# Altium footprint library UCP.PcbLib: 222 footprints (part 9 of 14)
Each footprint in its own frame and in the unit in brackets; x right, y up, seen from the top. Pads: shape width x height; smd on the part's side, far side on the other; paste and mask are expansions set on the pad; w line width, h text height; cw(c..) or ccw(c..) is an arc to the next point about the centre after c.
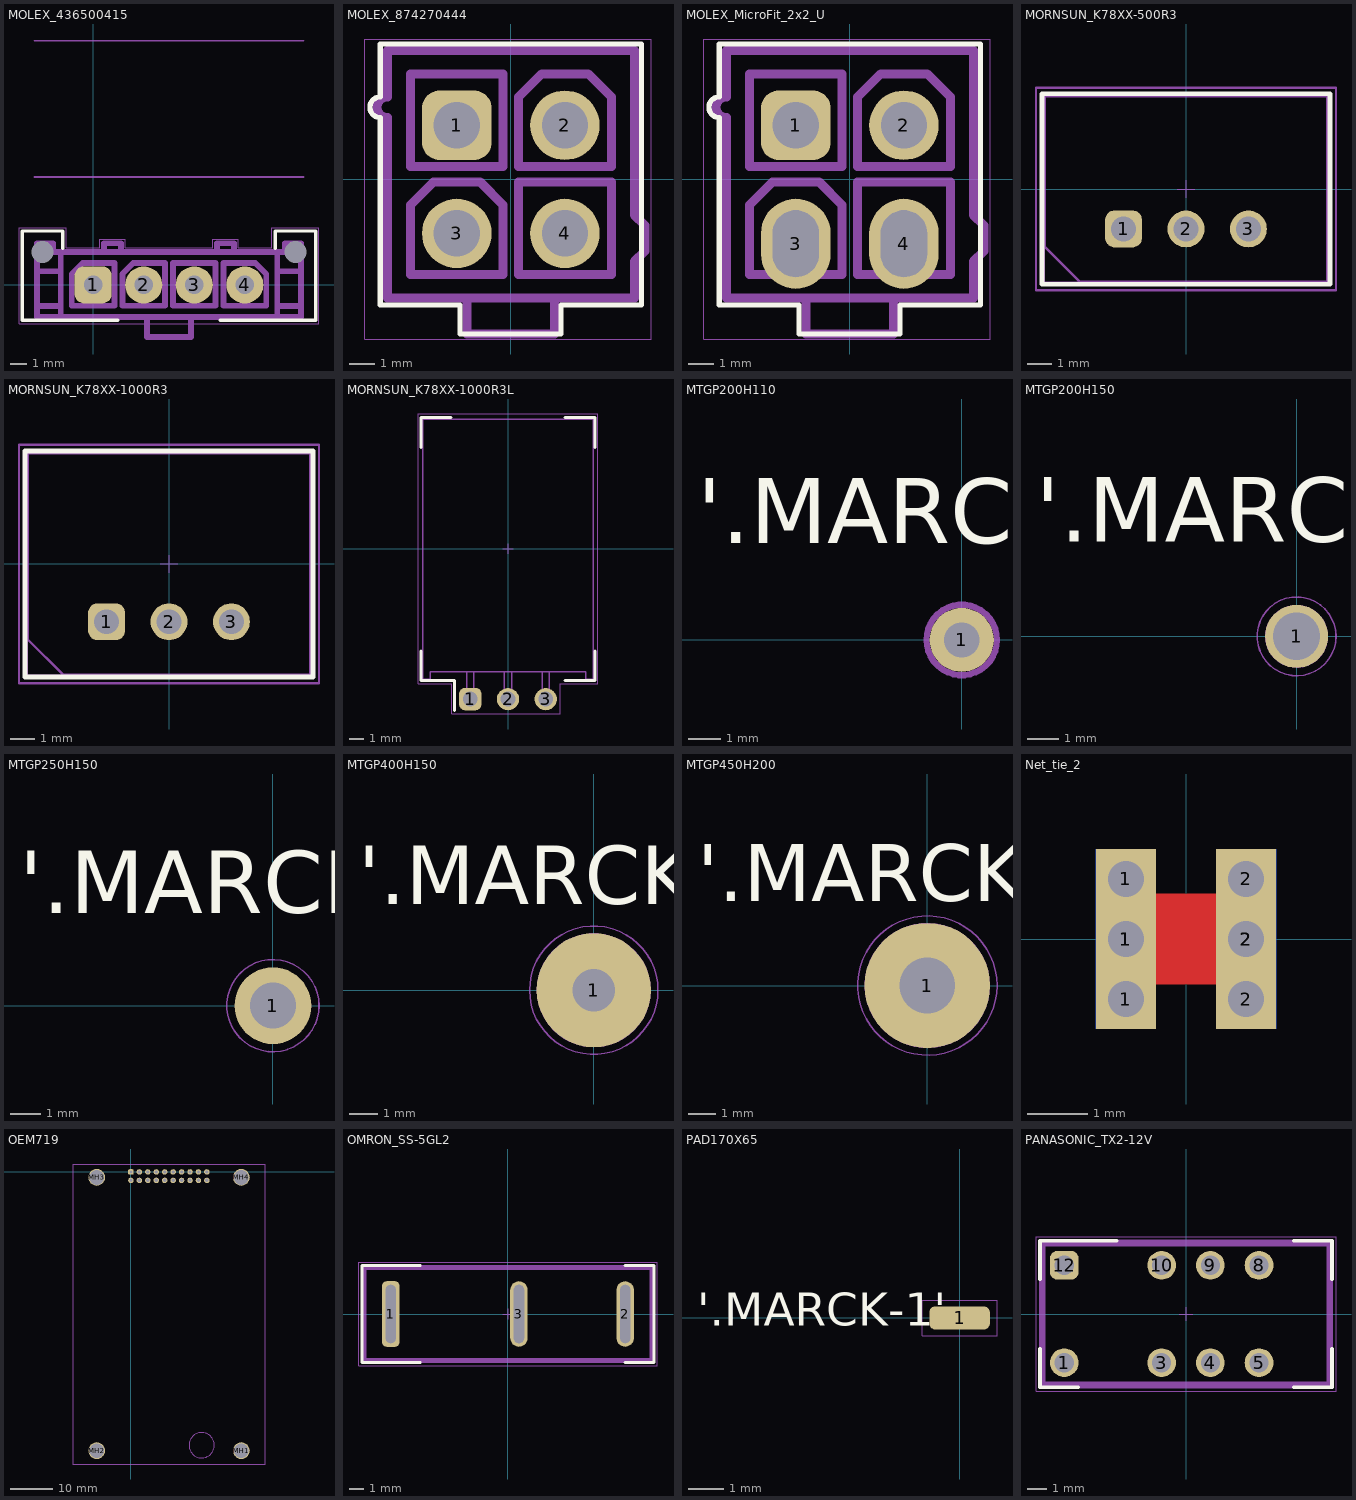
[diagram p8: the footprints below, top view; thin cyan lines are the x and y axes]

## MOLEX_436500415 [mm]
height 9
pads (6):
  rrect50% 2.2x2.2 hole 1.1: 1(0,0)
  round 2.2 hole 1.1: 2(3,0) 3(6,0) 4(9,0)
  round 0 hole 1.3 unplated mask+0.25: MT1(-3,1.96) MT2(12,1.96)
Top Overlay:
  lines w0.2: -1.8,2.16 -1.8,3.2 -4.2,3.2 -4.2,-2.1 1.475,-2.1 ; 7.525,-2.1 13.2,-2.1 13.2,3.2 10.8,3.2 10.8,2.16
Dimensions:
  lines w0.1: -3.5,6.4 12.5,6.4 ; -3.5,14.48 12.5,14.48
  text "Min" at 10.41,6.52 h1.6
  text "Max" at 10.41,14.6 h1.6
  text "Bord edge" at 2,14.6 h1.6
  text "Bord edge" at 2,6.52 h1.6
Top Assembly:
  lines w0.35: 0.65,1.96 0.65,2.47 1.65,2.47 1.65,1.96 ; 3.2,-1.9 3.2,-3.1 5.8,-3.1 5.8,-1.9 ; 7.35,1.96 7.35,2.47 8.35,2.47 8.35,1.96 ; -3.325,-1.26 -3.325,-1.9 -1.925,-1.9 ; -3.325,-1.26 -1.925,-1.26 ; -3.325,-1.26 -3.325,0.81 ; -3.325,0.81 -1.925,0.81 ; -3.325,0.81 -3.325,1.45 ; -3.325,1.45 -2.39,1.96 ; -3.325,1.45 -3.325,2.47 -2.39,2.47 -2.39,1.96 ; -2.39,1.96 -1.925,1.96 ; -1.925,-1.9 -1.925,-1.26 ; -1.925,-1.9 10.925,-1.9 ; -1.925,-1.26 -1.925,0.81 ; -1.925,0.81 -1.925,1.96 ; -1.925,1.96 10.925,1.96 ; -0.32,-0.32 0.32,-0.32 ; -0.32,-0.32 -0.32,0.32 ; -0.32,-0.32 -0.111,-0.111 ; -0.32,0.32 0.32,0.32 ; -0.32,0.32 -0.111,0.111 ; -0.111,-0.111 0.111,-0.111 ; -0.111,-0.111 -0.111,0.111 ; -0.111,0.111 0.111,0.111 ; 0.111,-0.111 0.111,0.111 ; 0.111,-0.111 0.32,-0.32 ; 0.111,0.111 0.32,0.32 ; 0.32,-0.32 0.32,0.32 ; 2.68,-0.32 2.68,0.32 ; 2.68,-0.32 2.9,-0.111 ; 2.68,-0.32 3.32,-0.32 ; 2.68,0.32 2.9,0.111 ; 2.68,0.32 3.32,0.32 ; 2.9,-0.111 2.9,0.111 ; 2.9,-0.111 3.1,-0.111 ; 2.9,0.111 3.1,0.111 ; 3.1,-0.111 3.1,0.111 ; 3.1,-0.111 3.32,-0.32 ; 3.1,0.111 3.32,0.32 ; 3.32,-0.32 3.32,0.32 ; 5.68,-0.32 5.68,0.32 ; 5.68,-0.32 6.32,-0.32 ; 5.68,-0.32 5.889,-0.111 ; 5.68,0.32 5.889,0.111 ; 5.68,0.32 6.32,0.32 ; 5.889,-0.111 5.889,0.111 ; 5.889,-0.111 6.111,-0.111 ; 5.889,0.111 6.111,0.111 ; 6.111,-0.111 6.32,-0.32 ; 6.111,-0.111 6.111,0.111 ; 6.111,0.111 6.32,0.32 ; 6.32,-0.32 6.32,0.32 ; 8.68,-0.32 8.9,-0.111 ; 8.68,-0.32 8.68,0.32 ; 8.68,-0.32 9.32,-0.32 ; 8.68,0.32 8.9,0.111 ; 8.68,0.32 9.32,0.32 ; 8.9,-0.111 8.9,0.111 ; 8.9,-0.111 9.1,-0.111 ; 8.9,0.111 9.1,0.111 ; 9.1,-0.111 9.32,-0.32 ; 9.1,-0.111 9.1,0.111 ; 9.1,0.111 9.32,0.32 ; 9.32,-0.32 9.32,0.32 ; 10.925,-1.9 12.325,-1.9 12.325,-1.26 ; 10.925,-1.9 10.925,-1.26 ; 10.925,-1.26 12.325,-1.26 ; 10.925,-1.26 10.925,0.81 ; 10.925,0.81 10.925,1.96 ; 10.925,0.81 12.325,0.81 ; 10.925,1.96 11.39,1.96 ; 11.39,1.96 11.39,2.47 12.325,2.47 12.325,1.45 ; 11.39,1.96 12.325,1.45 ; 12.325,-1.26 12.325,0.81 ; 12.325,0.81 12.325,1.45 ; -1.27,-1.24 1.27,-1.24 1.27,1.3 -0.62,1.3 -1.27,0.65 -1.27,-1.24 ; 1.73,-1.24 4.27,-1.24 4.27,1.3 2.38,1.3 1.73,0.65 1.73,-1.24 ; 4.73,-1.24 7.27,-1.24 7.27,1.3 4.73,1.3 4.73,-1.24 ; 7.73,-1.24 7.73,1.3 9.62,1.3 10.27,0.65 10.27,-1.24 7.73,-1.24
Top Courtyard:
  lines w0.05: -4.4,-2.3 13.4,-2.3 13.4,3.4 10.6,3.4 10.6,2.21 8.6,2.21 8.6,2.72 7.1,2.72 7.1,2.21 1.9,2.21 1.9,2.72 0.4,2.72 0.4,2.21 -1.6,2.21 -1.6,3.4 -4.4,3.4 -4.4,-2.3
Top Component Outline:
  lines w0.025: -3.325,-1.9 -3.325,1.57 -3.325,2.47 -2.69,2.47 -2.39,2.47 -2.39,1.96 0.65,1.96 0.65,2.47 1.65,2.47 1.65,1.96 7.35,1.96 7.35,2.47 8.35,2.47 8.35,1.96 11.39,1.96 11.39,2.47 11.69,2.47 12.325,2.47 12.325,1.57 12.325,-1.9 -3.325,-1.9
Top Component Terminal:
  lines w0.025: -0.32,-0.32 0.32,-0.32 0.32,0.32 -0.32,0.32 -0.32,-0.32 ; 2.68,-0.32 3.32,-0.32 3.32,0.32 2.68,0.32 2.68,-0.32 ; 5.68,-0.32 6.32,-0.32 6.32,0.32 5.68,0.32 5.68,-0.32 ; 8.68,-0.32 9.32,-0.32 9.32,0.32 8.68,0.32 8.68,-0.32
3D body "Вилка 436500415.stp": height 9.9, standoff -3.18, extent -3.325,-3.1 12.325,2.47

## MOLEX_874270444 [mm] "Header, Vertical Receptacle, 4.20 mm row X 5.50 mm column pitch; 1.19 mm lead width, 4 pins, 2 rows, 2 pins per row, 9.80 mm L X 9.60 mm W X 13.05 mm H body"
height 13.1
pads (4):
  rrect50% 2.7x2.7 hole 1.8: 1(-2.1,2.1)
  round 2.7 hole 1.8: 2(2.1,2.1) 3(-2.1,-2.1) 4(2.1,-2.1)
Top Overlay:
  lines w0.2: -5.075,2.398 cw(c-5.075,2.799) -5.075,3.2 -5.075,5.25 5.075,5.25 5.075,-4.875 1.95,-4.875 1.95,-6 -1.975,-6 -1.975,-4.875 -5.075,-4.875 -5.075,2.4
Top Assembly:
  lines w0.35: -1.7,-4.6 1.7,-4.6 ; -1.7,-4.6 -1.7,-6 1.7,-6 1.7,-4.6 ; -1.7,-4.6 -4.8,-4.6 -4.8,2.4 cw(c-4.8,2.8) -4.8,3.2 -4.8,5 4.8,5 4.8,-1.39 5.2,-1.79 5.2,-2.79 4.8,-3.19 4.8,-4.6 1.7,-4.6 ; -3.9,-3.7 -0.3,-3.7 -0.3,-1 -1.2,-0.1 -3,-0.1 -3.9,-1 -3.9,-3.7 ; -3.9,0.5 -0.3,0.5 -0.3,4.1 -3.9,4.1 -3.9,0.5 ; 0.3,-3.7 0.3,-0.1 3.9,-0.1 3.9,-3.7 0.3,-3.7 ; 0.3,0.5 0.3,3.2 1.2,4.1 3,4.1 3.9,3.2 3.9,0.5 0.3,0.5
Top Courtyard:
  lines w0.025: -5.675,-6.2 -5.675,5.45 5.45,5.45 5.45,-6.2 -5.675,-6.2
Top Component Outline:
  lines w0.025: -4.8,-4.6 -4.8,2.4 cw(c-4.8,2.8) -4.8,3.2 -4.8,5 4.8,5 4.8,-1.39 5.2,-1.79 5.2,-2.79 4.8,-3.19 4.8,-4.6 -4.8,-4.6
Top Component Terminal:
  lines w0.025: -2.65,-2.65 -2.65,-1.55 -1.55,-1.55 -1.55,-2.65 -2.65,-2.65 ; -2.65,1.55 -2.65,2.65 -1.55,2.65 -1.55,1.55 -2.65,1.55 ; 1.55,-2.65 1.55,-1.55 2.65,-1.55 2.65,-2.65 1.55,-2.65 ; 1.55,1.55 1.55,2.65 2.65,2.65 2.65,1.55 1.55,1.55
3D body "874270444.stp": height 13.5, standoff -2.1, extent -5.4,-6 5.4,5.4

## MOLEX_MicroFit_2x2_U [mm] "Header, Vertical Receptacle, 4.20 mm row X 5.50 mm column pitch; 1.19 mm lead width, 4 pins, 2 rows, 2 pins per row, 9.80 mm L X 9.60 mm W X 13.05 mm H body"
height 13.1
pads (4):
  rrect50% 2.7x2.7 hole 1.8: 1(-2.1,2.1)
  round 2.7 hole 1.8: 2(2.1,2.1)
  oval 2.7x3.5 hole 2.6 slot 1.8 at 0 deg: 3(-2.1,-2.5) 4(2.1,-2.5)
Top Overlay:
  lines w0.2: -5.075,2.398 cw(c-5.075,2.799) -5.075,3.2 -5.075,5.25 5.075,5.25 5.075,-4.875 1.95,-4.875 1.95,-6 -1.975,-6 -1.975,-4.875 -5.075,-4.875 -5.075,2.4
Top Assembly:
  lines w0.35: -1.7,-4.6 -4.8,-4.6 -4.8,2.4 cw(c-4.8,2.8) -4.8,3.2 -4.8,5 4.8,5 4.8,-1.39 5.2,-1.79 5.2,-2.79 4.8,-3.19 4.8,-4.6 1.7,-4.6 ; -1.7,-4.6 -1.7,-6 1.7,-6 1.7,-4.6 ; -1.7,-4.6 1.7,-4.6 ; -3.9,-3.7 -3.9,-1 -3,-0.1 -1.2,-0.1 -0.3,-1 -0.3,-3.7 -3.9,-3.7 ; -3.9,0.5 -3.9,4.1 -0.3,4.1 -0.3,0.5 -3.9,0.5 ; 0.3,-3.7 3.9,-3.7 3.9,-0.1 0.3,-0.1 0.3,-3.7 ; 0.3,0.5 3.9,0.5 3.9,3.2 3,4.1 1.2,4.1 0.3,3.2 0.3,0.5
Top Courtyard:
  lines w0.025: -5.675,-6.2 5.45,-6.2 5.45,5.45 -5.675,5.45 -5.675,-6.2
Top Component Outline:
  lines w0.025: -4.8,-4.6 4.8,-4.6 4.8,-3.19 5.2,-2.79 5.2,-1.79 4.8,-1.39 4.8,5 -4.8,5 -4.8,3.2 ccw(c-4.8,2.8) -4.8,2.4 -4.8,-4.6
Top Component Terminal:
  lines w0.025: -2.65,-2.85 -1.55,-2.85 ; -2.651,-2.85 -1.55,-2.85 ; -2.651,-2.85 -2.651,-3.49 -1.55,-3.49 -1.55,-2.85 ; 1.55,-2.85 2.65,-2.85 ; 1.55,-2.85 1.55,-3.49 2.651,-3.49 2.651,-2.85 ; 1.55,-2.85 2.651,-2.85 ; -2.65,-2.65 -1.55,-2.65 -1.55,-1.55 -2.65,-1.55 -2.65,-2.65 ; -2.65,1.55 -1.55,1.55 -1.55,2.65 -2.65,2.65 -2.65,1.55 ; -2.651,2.01 -1.55,2.01 -1.55,2.65 -2.651,2.65 -2.651,2.01 ; 1.55,-2.65 2.65,-2.65 2.65,-1.55 1.55,-1.55 1.55,-2.65 ; 1.55,1.55 2.65,1.55 2.65,2.65 1.55,2.65 1.55,1.55 ; 1.551,2.01 2.651,2.01 2.651,2.65 1.551,2.65 1.551,2.01
3D body "874270444.stp": height 13.5, standoff -2.1, extent -5.4,-6 5.4,5.4

## MORNSUN_K78XX-500R3 [mm] "3 pin, L = 11.60 mm, W = 7.55mm, H = 10.16 mm"
height 10.16
pads (3):
  rrect50% 1.5x1.5 hole 1: 1(-2.54,-1.625)
  round 1.5 hole 1: 2(0,-1.625) 3(2.54,-1.625)
Top Overlay:
  lines w0.2: -5.85,-3.875 5.85,-3.875 5.85,3.875 -5.85,3.875 -5.85,-3.875
Top Assembly:
  lines w0.1: -5.75,-2.335 -5.75,3.775 5.75,3.775 5.75,-3.775 -4.31,-3.775 -5.75,-2.335
Top Courtyard:
  lines w0.05: -0.35,0 0.35,0 ; 0,-0.35 0,0.35
  lines w0.1: -6.1,-4.125 6.1,-4.125 6.1,4.125 -6.1,4.125 -6.1,-4.125
Top Component Outline:
  lines w0.025: -5.75,-3.775 -5.75,3.775 5.75,3.775 5.75,-3.775 -5.75,-3.775
Top Component Terminal:
  lines w0.025: -2.79,-1.775 -2.79,-1.475 -2.29,-1.475 -2.29,-1.775 -2.79,-1.775 ; -0.25,-1.775 -0.25,-1.475 0.25,-1.475 0.25,-1.775 -0.25,-1.775 ; 2.29,-1.775 2.29,-1.475 2.79,-1.475 2.79,-1.775 2.29,-1.775
3D body "SIP3_S.stp": height 10.16, standoff -4.1, extent -5.8,-3.775 5.8,3.775

## MORNSUN_K78XX-1000R3 [mm] "3 pin, L = 11.50 mm, W = 9.00 mm, H = 17.50 mm"
height 17.5
pads (3):
  rrect50% 1.5x1.5 hole 1: 1(-2.54,-2.35)
  round 1.5 hole 1: 2(0,-2.35) 3(2.54,-2.35)
Top Overlay:
  lines w0.2: -5.85,-4.6 5.85,-4.6 5.85,4.6 -5.85,4.6 -5.85,-4.6
Top Assembly:
  lines w0.1: -5.75,-3.06 -5.75,4.5 5.75,4.5 5.75,-4.5 -4.31,-4.5 -5.75,-3.06
Top Courtyard:
  lines w0.05: -0.35,0 0.35,0 ; 0,-0.35 0,0.35
  lines w0.1: -6.1,-4.85 6.1,-4.85 6.1,4.85 -6.1,4.85 -6.1,-4.85
Top Component Outline:
  lines w0.025: -5.75,-4.5 -5.75,4.5 5.75,4.5 5.75,-4.5 -5.75,-4.5
Top Component Terminal:
  lines w0.025: -2.79,-2.5 -2.79,-2.2 -2.29,-2.2 -2.29,-2.5 -2.79,-2.5 ; -0.25,-2.5 -0.25,-2.2 0.25,-2.2 0.25,-2.5 -0.25,-2.5 ; 2.29,-2.5 2.29,-2.2 2.79,-2.2 2.79,-2.5 2.29,-2.5
3D body "SIP3.stp": height 17.5, standoff -4.1, extent -5.75,-4.5 5.75,4.5

## MORNSUN_K78XX-1000R3L [mm] "3 pin, L = 11.50 mm, W = 19.00 mm, H = 9 mm"
height 9
pads (3):
  rrect50% 1.5x1.5 hole 1: 1(-2.54,-10.125)
  round 1.5 hole 1: 2(0,-10.125) 3(2.54,-10.125)
Top Overlay:
  lines w0.2: -5.85,-6.875 -5.85,-8.875 -3.59,-8.875 -3.59,-10.875 ; -5.85,6.825 -5.85,8.825 -3.85,8.825 ; 3.85,-8.875 5.85,-8.875 5.85,-6.875 ; 3.85,8.825 5.85,8.825 5.85,6.825
Top Assembly:
  lines w0.1: -5.75,-8.775 -5.25,-8.775 -5.25,-8.275 5.25,-8.275 5.25,-8.775 5.75,-8.775 5.75,8.725 -5.75,8.725 -5.75,-8.775 ; -2.79,-10.275 -2.29,-10.275 -2.29,-8.275 -2.79,-8.275 -2.79,-10.275 ; -0.25,-10.275 0.25,-10.275 0.25,-8.275 -0.25,-8.275 -0.25,-10.275 ; 2.29,-10.275 2.79,-10.275 2.79,-8.275 2.29,-8.275 2.29,-10.275
Top Courtyard:
  lines w0.05: -0.35,0 0.35,0 ; 0,-0.35 0,0.35 ; -6.05,-9.075 -3.79,-9.075 -3.79,-11.125 3.535,-11.125 3.535,-9.075 6.05,-9.075 6.05,9.075 -6.05,9.075 -6.05,-9.075
Top Component Outline:
  lines w0.1: -5.75,-8.775 -5.25,-8.775 -5.25,-8.275 5.25,-8.275 5.25,-8.775 5.75,-8.775 5.75,8.725 -5.75,8.725 -5.75,-8.775
Top Component Terminal:
  lines w0.025: -2.79,-10.275 -2.79,-9.975 -2.29,-9.975 -2.29,-10.275 -2.79,-10.275 ; -0.25,-10.275 -0.25,-9.975 0.25,-9.975 0.25,-10.275 -0.25,-10.275 ; 2.29,-10.275 2.29,-9.975 2.79,-9.975 2.79,-10.275 2.29,-10.275
3D body "SIP3L.stp": height 9, standoff -4.1, extent -5.75,-10.275 5.75,8.725

## MTGP200H110 [mm] "Mounting Hole, Plated; 2.0 mm Pad, 1.10 mm Hole"
pads (1):
  round 2 hole 1.1: 1(0,0)
Top Overlay:
  text "'.MARCK-1'" at -8.262,2.339 h3.5
Top Designator:
  text ".Designator" at 0,0 h1.2
Top Assembly:
  circle w0.2: c0,0 r1.1
Bottom Assembly:
  circle w0.2: c0,0 r1.1
Top Courtyard:
  circle w0.05: c0,0 r1.1

## MTGP200H150 [mm] "Mounting Hole, Plated; 2.00 mm Pad, 1.50 mm Hole"
pads (1):
  round 2 hole 1.5: 1(0,0)
Top Overlay:
  text "'.MARCK-1'" at -8.262,2.339 h3.5
Top Designator:
  text ".Designator" at 0,0 h1.2
Top Assembly:
  circle w0.2: c0,0 r0.9
Bottom Assembly:
  circle w0.2: c0,0 r0.9
Top Courtyard:
  circle w0.05: c0,0 r1.25

## MTGP250H150 [mm] "Mounting Hole, Plated; 2.50 mm Pad, 1.50 mm Hole"
pads (1):
  round 2.5 hole 1.5: 1(0,0)
Top Overlay:
  text "'.MARCK-1'" at -8.262,2.339 h3.5
Top Designator:
  text ".Designator" at 0,0 h1.2
Top Assembly:
  circle w0.2: c0,0 r0.9
Bottom Assembly:
  circle w0.2: c0,0 r0.9
Top Courtyard:
  circle w0.05: c0,0 r1.5

## MTGP400H150 [mm] "Mounting Hole, Plated; 4.00 mm Pad, 1.50 mm Hole"
pads (1):
  round 4 hole 1.5: 1(0,0)
Top Overlay:
  text "'.MARCK-1'" at -8.262,2.339 h3.5
Top Designator:
  text ".Designator" at 0,0 h1.2
Top Assembly:
  circle w0.2: c0,0 r0.65
  circle w0.2: c0,0 r1.9
Bottom Assembly:
  circle w0.2: c0,0 r0.65
  circle w0.2: c0,0 r1.9
Top Courtyard:
  circle w0.05: c0,0 r2.25

## MTGP450H200 [mm] "Mounting Hole, Plated; 4.50 mm Pad, 2.00 mm Hole"
pads (1):
  round 4.5 hole 2: 1(0,0)
Top Overlay:
  text "'.MARCK-1'" at -8.262,2.339 h3.5
Top Designator:
  text ".Designator" at 0,0 h1.2
Top Assembly:
  circle w0.2: c0,0 r2.15
  circle w0.2: c0,0 r0.9
Bottom Assembly:
  circle w0.2: c0,0 r2.15
  circle w0.2: c0,0 r0.9
Top Courtyard:
  circle w0.05: c0,0 r2.5

## Net_tie_2 [mm] "Connection 2 pin"
pads (10):
  rect 1x1 hole 0.6 mask+0.102: 1(-1,-1) 1(-1,0) 1(-1,1) 2(1,-1) 2(1,0) 2(1,1)
  rect 1x3 smd mask+0.102: 1(-1,0) 2(1,0)
  rect 1x3 smd far side mask+0: 1(-1,0) 2(1,0)
Top Layer:
  region: -0.75,0.75 0.75,0.75 0.75,-0.75 -0.75,-0.75

## OEM719 [mm]
pads (24):
  rrect50% 1.3x1.3 hole 0.8: 1(0,0)
  round 1.3 hole 0.8: 2(0,-2) 3(2,0) 4(2,-2) 5(4,0) 6(4,-2) 7(6,0) 8(6,-2) 9(8,0) 10(8,-2) 11(10,0) 12(10,-2) 13(12,0) 14(12,-2) 15(14,0) 16(14,-2) 17(16,0) 18(16,-2) 19(18,0) 20(18,-2)
  round 4 hole 3.5: MH1(26.16,-66.05) MH2(-8.13,-66.05) MH3(-8.13,-1.28) MH4(26.16,-1.28)
Top Designator:
  text ".Designator" at -4.511,-0.453 h2
Top Dimensions:
  circle w0.254: c16.77,-64.76 r3
  lines w0.1: -13.83,-69.21 31.87,-69.21 31.87,1.89 -13.83,1.89 -13.83,-69.21
3D body "OEM719.stp": height 10.92, standoff -6, extent -13.843,-69.215 31.877,1.905

## OMRON_SS-5GL2 [mm]
height 19.3
pads (3):
  rrect50% 1.2x4.5 hole 0.7 slot 4 at 90 deg: 1(-8.05,0)
  oval 1.2x4.5 hole 0.7 slot 4 at 90 deg: 2(8.05,0) 3(0.75,0)
Top Overlay:
  lines w0.2: -6.025,-3.325 -10.025,-3.325 -10.025,3.325 -6.025,3.325 ; 8.025,-3.325 10.025,-3.325 10.025,3.325 8.025,3.325
Top Assembly:
  lines w0.35: -9.9,-3.2 9.9,-3.2 9.9,3.2 -9.9,3.2 -9.9,-3.2
Top Courtyard:
  lines w0.05: -0.35,0 0.35,0 ; 0,-0.35 0,0.35 ; -10.25,-3.55 10.25,-3.55 10.25,3.55 -10.25,3.55 -10.25,-3.55
Top Component Outline:
  lines w0.05: 9.9,-3.2 -9.9,-3.2 -9.9,3.2 9.9,3.2 ; 9.9,-3.2 9.9,-3.2 ; 9.9,-3.2 9.9,3.2 ; 9.9,3.2 9.9,3.2
Top Component Terminal:
  lines w0.025: -8.3,-1.6 -7.8,-1.6 -7.8,1.6 -8.3,1.6 -8.3,-1.6 ; 0.5,-1.6 1,-1.6 1,1.6 0.5,1.6 0.5,-1.6 ; 7.8,-1.6 8.3,-1.6 8.3,1.6 7.8,1.6 7.8,-1.6
3D body "OMRON_SS-5GL2.stp": height 19.31, standoff -3.5, extent -9.9,-3.2 9.9,3.2

## PAD170X65 [mm] "Pad for mounting wire L=1.70 mm W=0.65 mm"
height 1
pads (1):
  rrect50% 1.7x0.65 smd: 1(0,0)
Top Overlay:
  text "'.MARCK-1'" at -7.377,-0.531 h1.6
Top Designator:
  text ".Designator" at -4.511,-0.453 h2
Top Courtyard:
  lines w0.025: -0.2,0 0.2,0 ; 0,-0.2 0,0.2 ; -1.05,-0.5 1.05,-0.5 1.05,0.5 -1.05,0.5 -1.05,-0.5

## PANASONIC_TX2-12V [mm]
pads (8):
  round 1.5 hole 1: 1(-6.35,-2.54) 3(-1.27,-2.54) 4(1.27,-2.54) 5(3.81,-2.54) 8(3.81,2.54) 9(1.27,2.54) 10(-1.27,2.54)
  rrect50% 1.5x1.5 hole 1: 12(-6.35,2.54)
Top Overlay:
  lines w0.2: -7.625,-1.825 -7.625,-3.825 -5.625,-3.825 ; -7.625,1.825 -7.625,3.825 -3.625,3.825 ; 5.625,-3.825 7.625,-3.825 7.625,-1.825 ; 5.625,3.825 7.625,3.825 7.625,1.825
Top Assembly:
  lines w0.35: -7.5,-3.7 7.5,-3.7 7.5,3.7 -7.5,3.7 -7.5,-3.7
Top Courtyard:
  lines w0.05: -0.35,0 0.35,0 ; 0,-0.35 0,0.35 ; -7.825,-4.025 -7.825,4.025 7.825,4.025 7.825,-4.025 -7.825,-4.025
Top Component Outline:
  lines w0.05: -7.5,-3.7 7.5,-3.7 7.5,3.7 -7.5,3.7 -7.5,-3.7
Top Component Terminal:
  lines w0.025: -6.6,-2.665 -6.1,-2.665 -6.1,-2.415 -6.6,-2.415 -6.6,-2.665 ; -6.6,2.415 -6.1,2.415 -6.1,2.665 -6.6,2.665 -6.6,2.415 ; -1.52,-2.665 -1.02,-2.665 -1.02,-2.415 -1.52,-2.415 -1.52,-2.665 ; -1.52,2.415 -1.02,2.415 -1.02,2.665 -1.52,2.665 -1.52,2.415 ; 1.02,-2.665 1.52,-2.665 1.52,-2.415 1.02,-2.415 1.02,-2.665 ; 1.02,2.415 1.52,2.415 1.52,2.665 1.02,2.665 1.02,2.415 ; 3.56,-2.665 4.06,-2.665 4.06,-2.415 3.56,-2.415 3.56,-2.665 ; 3.56,2.415 4.06,2.415 4.06,2.665 3.56,2.665 3.56,2.415
3D body "NA12W-K.stp": height 10.02, standoff -3.5, extent -7.45,-3.7 7.45,3.7